# Altium footprint library Socket2x4-254mm.PcbLib: 1 footprints
Each footprint in its own frame and in the unit in brackets; x right, y up, seen from the top. Pads: shape width x height; smd on the part's side, far side on the other; paste and mask are expansions set on the pad; w line width, h text height; cw(c..) or ccw(c..) is an arc to the next point about the centre after c.
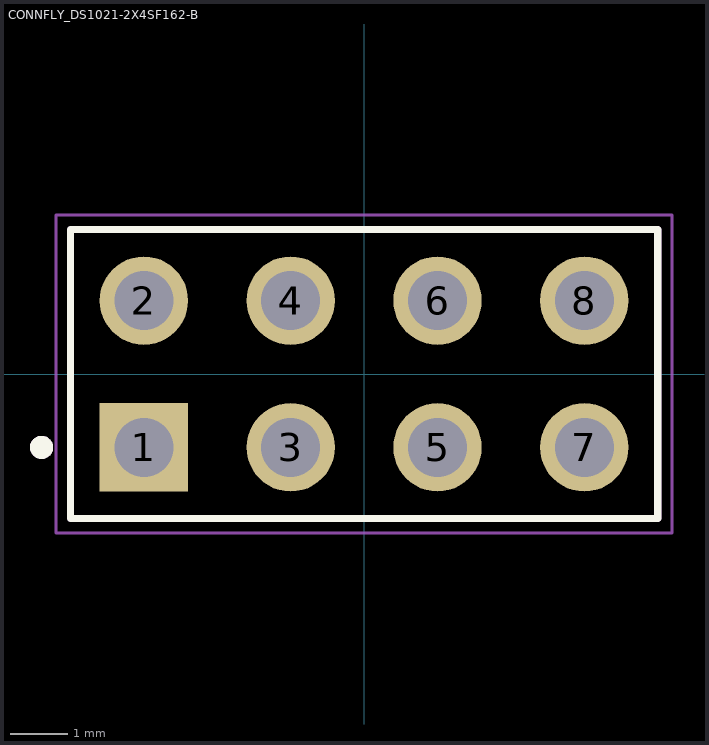
[diagram p0: the footprint, top view; thin cyan lines are the x and y axes]

## CONNFLY_DS1021-2X4SF162-B [mm]
pads (8):
  rect 1.53x1.53 / inner round 1.53 / far side rect 1.53x1.53 hole 1.02 mask+0.102: 1(-3.81,-1.27)
  round 1.53 hole 1.02 mask+0.102: 2(-3.81,1.27) 3(-1.27,-1.27) 4(-1.27,1.27) 5(1.27,-1.27) 6(1.27,1.27) 7(3.81,-1.27) 8(3.81,1.27)
Top Overlay:
  circle w0.2: c-5.58,-1.27 r0.1
  lines w0.127: -5.08,-2.5 5.08,-2.5 5.08,2.5 -5.08,2.5 -5.08,-2.5
Top 3D Body:
  circle w0.2: c-5.58,-1.27 r0.1
  lines w0.127: -5.08,-2.5 -5.08,2.5 5.08,2.5 5.08,-2.5 -5.08,-2.5
Top Courtyard:
  lines w0.05: -5.33,-2.75 -5.33,2.75 5.33,2.75 5.33,-2.75 -5.33,-2.75
Top Designator (Mech29):
  text ".Designator" at 0.333,-4.998 h1
3D body "step_temp.STEP": height 7.5, standoff -3, extent -5.08,-2.5 5.08,2.5